# Altium footprint library SamacSys.PcbLib: 1008 footprints (part 25 of 63)
Each footprint in its own frame and in the unit in brackets; x right, y up, seen from the top. Pads: shape width x height; smd on the part's side, far side on the other; paste and mask are expansions set on the pad; w line width, h text height; cw(c..) or ccw(c..) is an arc to the next point about the centre after c.
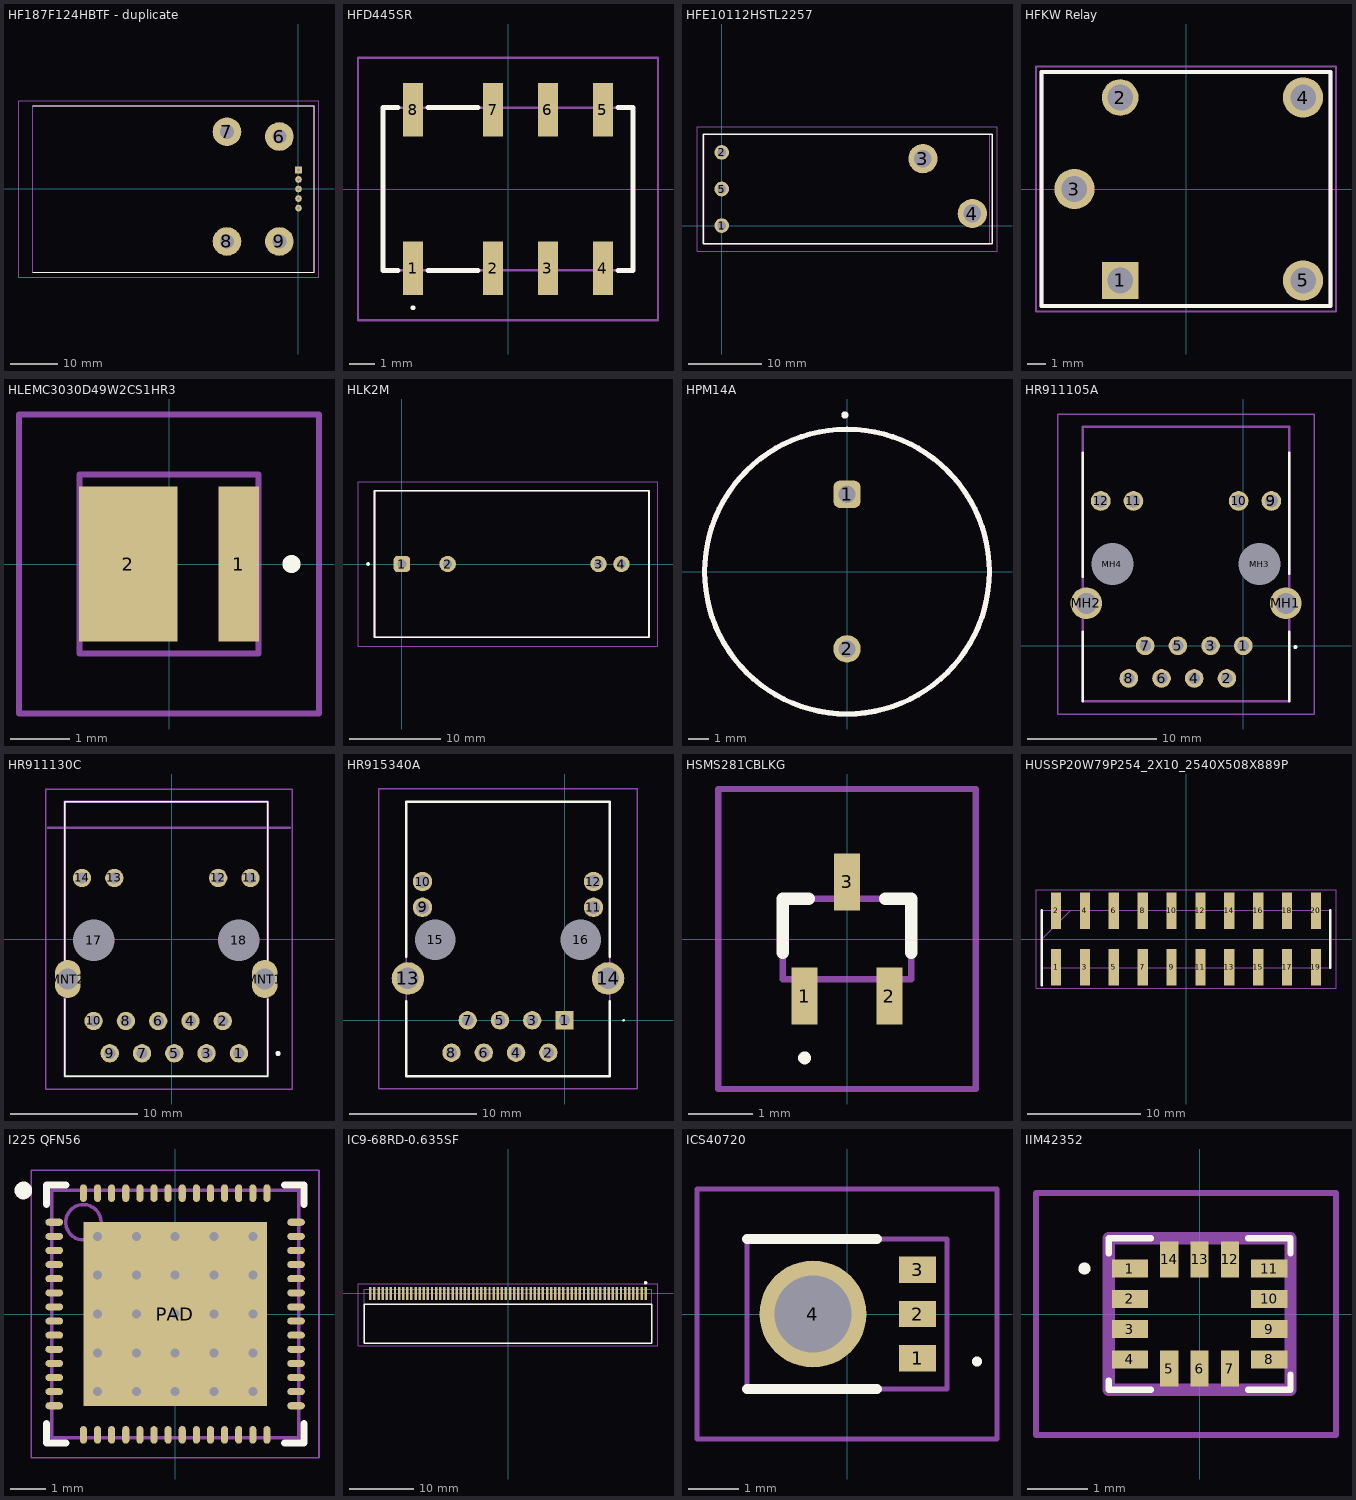
[diagram p24: the footprints below, top view; thin cyan lines are the x and y axes]

## HF187F124HBTF - duplicate [mm]
pads (9):
  rect 1.4x1.4 hole 0.7: 1(0,4)
  round 1.4 hole 0.7: 2(0,2) 3(0,0) 4(0,-4) 4(0,-2)
  round 6 hole 3: 6(-4,11) 7(-15,12) 8(-15,-11) 9(-4,-11)
Top Overlay:
  lines w0.2: -55.7,-17.5 3.3,-17.5 3.3,17.5 -55.7,17.5
Assembly:
  lines w0.1: -55.7,-17.5 3.3,-17.5 3.3,17.5 -55.7,17.5 -55.7,-17.5
Countryard:
  lines w0.1: -58.6,-18.5 4.3,-18.5 4.3,18.5 -58.6,18.5 -58.6,-18.5
3D body "HYCA-F08.STEP": height 5.27, standoff -27.11, extent -20,-13.05 2,13.05

## HFD445SR [mm]
pads (8):
  rect 0.8x2.15 smd: 1(-3.8,-3.175) 2(-0.6,-3.175) 3(1.6,-3.175) 4(3.8,-3.175) 5(3.8,3.175) 6(1.6,3.175) 7(-0.6,3.175) 8(-3.8,3.175)
Top Overlay:
  lines w0.1: -3.8,-4.8 cw(c-3.8,-4.75) -3.8,-4.7 cw(c-3.8,-4.75) -3.8,-4.8
  lines w0.2: -4.4,-3.25 -5,-3.25 -5,3.25 -4.4,3.25 ; -3.2,-3.25 -1.2,-3.25 ; -3.2,3.25 -1.2,3.25 ; 4.4,-3.25 5,-3.25 5,3.25 4.4,3.25
Assembly:
  lines w0.1: -5,-3.25 -5,3.25 5,3.25 5,-3.25 -5,-3.25
Countryard:
  lines w0.1: -6,-5.25 -6,5.25 6,5.25 6,-5.25 -6,-5.25
3D body "HFD4_4.5-SR.stp": height 5.76, standoff 0.11, extent -4.98,-3.86 5.02,3.64

## HFE10112HSTL2257 [mm]
pads (5):
  round 2 hole 1.2: 1(0,0) 2(0,10) 5(0,5)
  round 4 hole 2.4: 3(27.5,9.15) 4(34.25,1.65)
Top Overlay:
  lines w0.2: -2.5,-2.5 -2.5,12.5 37,12.5 37,-2.5 -2.5,-2.5
Assembly:
  lines w0.1: -2.375,-2.5 36.625,-2.5 36.625,12.5 -2.375,12.5 -2.375,-2.5
Countryard:
  lines w0.1: -3.375,-3.5 37.625,-3.5 37.625,13.5 -3.375,13.5 -3.375,-3.5
3D body "HFE10-1_12-HST-L2_257_.stp": height 32, standoff -5, extent -2.375,-2.5 36.625,12.5

## HFKW Relay [mm]
pads (5):
  rect 2x2 hole 1.4: 1(-3.6,-5)
  round 2 hole 1.4: 2(-3.6,5)
  round 2.2 hole 1.4: 3(-6.1,0) 4(6.4,5) 5(6.4,-5)
Top Overlay:
  lines w0.2: -7.9,-6.4 7.9,-6.4 7.9,6.4 -7.9,6.4 -7.9,-6.4
Assembly:
  lines w0.2: -7.9,-6.4 7.9,-6.4 7.9,6.4 -7.9,6.4 -7.9,-6.4
Countryard:
  lines w0.1: -8.2,-6.7 8.2,-6.7 8.2,6.7 -8.2,6.7 -8.2,-6.7
3D body: height 14, standoff 0, extent -7.8,-6.3 7.8,6.3

## HLEMC3030D49W2CS1HR3 [mm]
pads (2):
  rect 0.68x2.6 smd: 1(1.17,0)
  rect 1.65x2.6 smd: 2(-0.685,0)
Top Overlay:
  lines w0.2: 2,0 cw(c2.05,0) 2.1,0 ; 2,0 ccw(c2.05,0) 2.1,0 ; 2,0 cw(c2.05,0) 2.1,0
Assembly:
  lines w0.1: -1.5,-1.5 1.5,-1.5 1.5,1.5 -1.5,1.5 -1.5,-1.5
Countryard:
  lines w0.1: -2.51,-2.5 2.51,-2.5 2.51,2.5 -2.51,2.5 -2.51,-2.5
3D body "HL-EMC-3030D49W-2C-S1-HR3.stp": height 0.77, standoff 0, extent -1.5,-1.5 1.5,1.5

## HLK2M [mm]
height 19
pads (4):
  rrect50% 1.8x1.8 hole 1: 1(0,0)
  round 1.8 hole 1: 2(5,0) 3(21.5,0) 4(24,0)
Top Overlay:
  lines w0.2: -3.7,-0.1 cw(c-3.7,0) -3.7,0.1 cw(c-3.7,0) -3.7,-0.1 ; -3,-8 27,-8 27,8 -3,8 -3,-8
Assembly:
  lines w0.2: -3,-8 27,-8 27,8 -3,8 -3,-8
Countryard:
  lines w0.1: -4.8,-9 28,-9 28,9 -4.8,9 -4.8,-9
3D body "HLK-2M05.stp": height 19.1, standoff -5, extent -3,-8 27,8

## HPM14A [mm]
height 7
pads (2):
  rrect50% 1.35x1.35 hole 0.85: 1(0,3.8)
  round 1.35 hole 0.85: 2(0,-3.8)
Top Overlay:
  circle w0.254: c-0.1,7.7 r0.05
  circle w0.254: c0,0 r7
Assembly:
  circle w0.254: c0,0 r7
3D body: height 6.8, standoff 0, extent -6.939,-6.867 6.861,6.933

## HR911105A [mm]
pads (16):
  round 1.446 hole 0.89: 1(0,0) 2(-1.27,-2.54) 3(-2.54,0) 4(-3.81,-2.54) 5(-5.08,0) 6(-6.35,-2.54) 7(-7.62,0) 8(-8.89,-2.54)
  round 1.53 hole 1.02: 9(2.18,11.25) 10(-0.36,11.25) 11(-8.53,11.25) 12(-11.07,11.25)
  round 2.445 hole 1.63: MH1(3.3,3.3) MH2(-12.19,3.3)
  round 1.625 hole 3.25 unplated: MH3(1.27,6.35) MH4(-10.16,6.35)
Top Overlay:
  lines w0.2: -12.465,-4.3 -12.465,1.1 ; -12.465,5.35 -12.465,15 ; 3.575,-4.3 3.575,1.1 ; 3.575,5.6 3.575,15 ; 4.05,-0.15 ccw(c4.05,-0.1) 4.05,-0.05 ; 4.05,-0.15 cw(c4.05,-0.1) 4.05,-0.05 ; 4.05,-0.15 ccw(c4.05,-0.1) 4.05,-0.05
Assembly:
  lines w0.2: -12.465,-4.3 3.575,-4.3 3.575,17 -12.465,17 -12.465,-4.3
Countryard:
  lines w0.1: -14.417,-5.3 -14.417,18 5.518,18 5.518,-5.3 -14.417,-5.3
3D body "HR911105A.stp": height 13.53, standoff -2.97, extent -12.39,-4.08 3.49,17.32

## HR911130C [mm]
pads (18):
  round 1.446 hole 0.89: 1(5.265,-8.99) 2(3.995,-6.45) 3(2.725,-8.99) 4(1.455,-6.45) 5(0.185,-8.99) 6(-1.085,-6.45) 7(-2.355,-8.99) 8(-3.625,-6.45) 9(-4.895,-8.99) 10(-6.165,-6.45) 11(6.175,4.8) 12(3.635,4.8) 13(-4.535,4.8) 14(-7.075,4.8)
  round 1.625 hole 3.25 unplated: 17(-6.165,-0.1) 18(5.265,-0.1)
  oval 2x3 hole 1.63: MNT1(7.295,-3.15) MNT2(-8.195,-3.15)
Top Overlay:
  lines w0.1: -8.45,-4.7 -8.45,-10.8 7.55,-10.8 7.55,-4.7 ; -8.45,-1.7 -8.45,10.8 7.55,10.8 7.55,-1.7
  lines w0.2: 8.35,-9.1 cw(c8.35,-9) 8.35,-8.9 cw(c8.35,-9) 8.35,-9.1
Assembly:
  lines w0.2: -8.45,-10.8 7.55,-10.8 7.55,10.8 -8.45,10.8 -8.45,-10.8
Countryard:
  lines w0.1: -9.918,-11.8 9.45,-11.8 9.45,11.8 -9.918,11.8 -9.918,-11.8
Board Shape (Mech20):
  lines w0.2: -9.75,8.75 9.25,8.75
  text "PCB Edge" at -2.907,7.024 h2
3D body "HR911130C.stp": height 15.12, standoff -3.14, extent -9.39,-10.9 8.59,10.7

## HR915340A [mm]
pads (16):
  rect 1.446x1.446 hole 0.89: 1(0,0)
  round 1.446 hole 0.89: 2(-1.27,-2.54) 3(-2.54,0) 4(-3.81,-2.54) 5(-5.08,0) 6(-6.35,-2.54) 7(-7.62,0) 8(-8.89,-2.54)
  round 1.53 hole 1.02: 9(-11.17,8.89) 10(-11.17,10.92) 11(2.28,8.89) 12(2.28,10.92)
  round 2.55 hole 1.7: 13(-12.32,3.3) 14(3.43,3.3)
  round 1.6 hole 3.2 unplated: 15(-10.16,6.35) 16(1.27,6.35)
Top Overlay:
  lines w0.1: 4.6,0 cw(c4.65,0) 4.7,0 cw(c4.65,0) 4.6,0
  lines w0.2: -12.445,1.5 -12.445,-4.4 3.555,-4.4 3.555,1.5 ; -12.445,5 -12.445,17.2 3.555,17.2 3.555,5
Assembly:
  lines w0.1: -12.445,-4.4 3.555,-4.4 3.555,17.2 -12.445,17.2 -12.445,-4.4
Countryard:
  lines w0.1: -14.595,-5.4 5.705,-5.4 5.705,18.2 -14.595,18.2 -14.595,-5.4
3D body "HR915340A.stp": height 13.9, standoff -5, extent -13.07,-4.4 4.18,17.2

## HSMS281CBLKG [mil]
pads (3):
  rect 15.98x35 smd: 1(-25.98,-35) 2(25.98,-35) 3(0,35)
Top Overlay:
  lines w3.94: -25.98,-74.8 ccw(c-25.98,-72.83) -25.98,-70.87 ccw(c-25.98,-72.83) -25.98,-74.8
  lines w7.87: -39.37,-8.19 -39.37,24.61 -23.62,24.61 ; 23.62,24.61 39.37,24.61 39.37,-8.19
Assembly:
  lines w3.94: -39.37,-24.61 -39.37,24.61 39.37,24.61 39.37,-24.61 -39.37,-24.61
Countryard:
  lines w3.94: -78.74,-91.85 -78.74,91.85 78.74,91.85 78.74,-91.85 -78.74,-91.85
3D body "HSMS-281C-BLKG.stp": height 44.49, standoff 0.2, extent -44.29,-47.24 44.29,47.24

## HUSSP20W79P254_2X10_2540X508X889P [mm]
pads (20):
  rect 0.9x3.2 smd: 1(-11.43,-2.475) 2(-11.43,2.475) 3(-8.89,-2.475) 4(-8.89,2.475) 5(-6.35,-2.475) 6(-6.35,2.475) 7(-3.81,-2.475) 8(-3.81,2.475) 9(-1.27,-2.475) 10(-1.27,2.475) 11(1.27,-2.475) 12(1.27,2.475) 13(3.81,-2.475) 14(3.81,2.475) 15(6.35,-2.475) 16(6.35,2.475) 17(8.89,-2.475) 18(8.89,2.475) 19(11.43,-2.475) 20(11.43,2.475)
Top Overlay:
  lines w0.2: -12.7,-4.075 -12.7,2.54 ; 12.7,-2.54 12.7,2.54
Assembly:
  lines w0.1: -12.7,0 -10.16,2.54 ; -12.7,-2.54 12.7,-2.54 12.7,2.54 -12.7,2.54 -12.7,-2.54
Countryard:
  lines w0.05: -13.2,-4.325 13.2,-4.325 13.2,4.325 -13.2,4.325 -13.2,-4.325
3D body "61002021121.stp": height 9.95, standoff 0, extent -12.95,-3.75 12.95,3.75

## I225 QFN56 [mm]
pads (57):
  oval 0.5x0.2 smd: 1(-3.425,2.6) 2(-3.425,2.2) 3(-3.425,1.8) 4(-3.425,1.4) 5(-3.425,1) 6(-3.425,0.6) 7(-3.425,0.2) 8(-3.425,-0.2) 9(-3.425,-0.6) 10(-3.425,-1) 11(-3.425,-1.4) 12(-3.425,-1.8) 13(-3.425,-2.2) 14(-3.425,-2.6) 29(3.425,-2.6) 30(3.425,-2.2) 31(3.425,-1.8) 32(3.425,-1.4) 33(3.425,-1) 34(3.425,-0.6) 35(3.425,-0.2) 36(3.425,0.2) 37(3.425,0.6) 38(3.425,1) 39(3.425,1.4) 40(3.425,1.8) 41(3.425,2.2) 42(3.425,2.6)
  oval 0.2x0.5 smd: 15(-2.6,-3.425) 16(-2.2,-3.425) 17(-1.8,-3.425) 18(-1.4,-3.425) 19(-1,-3.425) 20(-0.6,-3.425) 21(-0.2,-3.425) 22(0.2,-3.425) 23(0.6,-3.425) 24(1,-3.425) 25(1.4,-3.425) 26(1.8,-3.425) 27(2.2,-3.425) 28(2.6,-3.425) 43(2.6,3.425) 44(2.2,3.425) 45(1.8,3.425) 46(1.4,3.425) 47(1,3.425) 48(0.6,3.425) 49(0.2,3.425) 50(-0.2,3.425) 51(-0.6,3.425) 52(-1,3.425) 53(-1.4,3.425) 54(-1.8,3.425) 55(-2.2,3.425) 56(-2.6,3.425)
  rect 5.2x5.2 smd: PAD(0,0)
via 2.2,2.2 diameter 0.406 hole 0.254
via 1.1,2.2 diameter 0.406 hole 0.254
via 0,2.2 diameter 0.406 hole 0.254
via -1.1,2.2 diameter 0.406 hole 0.254
via -2.2,2.2 diameter 0.406 hole 0.254
via 2.2,1.1 diameter 0.406 hole 0.254
via 1.1,1.1 diameter 0.406 hole 0.254
via 0,1.1 diameter 0.406 hole 0.254
via -1.1,1.1 diameter 0.406 hole 0.254
via -2.2,1.1 diameter 0.406 hole 0.254
via 2.2,0 diameter 0.406 hole 0.254
via 1.1,0 diameter 0.406 hole 0.254
via 0,0 diameter 0.406 hole 0.254
via -1.1,0 diameter 0.406 hole 0.254
via -2.2,0 diameter 0.406 hole 0.254
via 2.2,-1.1 diameter 0.406 hole 0.254
via 1.1,-1.1 diameter 0.406 hole 0.254
via 0,-1.1 diameter 0.406 hole 0.254
via -1.1,-1.1 diameter 0.406 hole 0.254
via -2.2,-1.1 diameter 0.406 hole 0.254
via 2.2,-2.2 diameter 0.406 hole 0.254
via 1.1,-2.2 diameter 0.406 hole 0.254
via 0,-2.2 diameter 0.406 hole 0.254
via -1.1,-2.2 diameter 0.406 hole 0.254
via -2.2,-2.2 diameter 0.406 hole 0.254
Top Overlay:
  circle w0.25: c-4.3,3.5 r0.125
  lines w0.2: -3.65,-3.1 -3.65,-3.65 -3.1,-3.65 ; -3.65,3.1 -3.65,3.65 -3.1,3.65 ; 3.1,-3.65 3.65,-3.65 3.65,-3.1 ; 3.1,3.65 3.65,3.65 3.65,3.1
Assembly:
  circle w0.1: c-2.6,2.6 r0.5
  lines w0.1: -3.5,-3.5 3.5,-3.5 3.5,3.5 -3.5,3.5 -3.5,-3.5
Countryard:
  lines w0.05: -4.075,-4.075 4.075,-4.075 4.075,4.075 -4.075,4.075 -4.075,-4.075
  lines w0.1: -0.5,0 0.5,0 ; 0,-0.5 0,0.5
3D body: height 0.9, standoff 0.05, extent -3.5,-3.5 3.5,3.5

## IC9-68RD-0.635SF [mm]
pads (68):
  rect 0.38x2 smd: 1(21.273,0) 2(20.002,0) 3(18.732,0) 4(17.462,0) 5(16.192,0) 6(14.922,0) 7(13.652,0) 8(12.383,0) 9(11.112,0) 10(9.842,0) 11(8.572,0) 12(7.302,0) 13(6.032,0) 14(4.763,0) 15(3.492,0) 16(2.222,0) 17(0.953,0) 18(-0.318,0) 19(-1.587,0) 20(-2.857,0) 21(-4.127,0) 22(-5.397,0) 23(-6.667,0) 24(-7.938,0) 25(-9.207,0) 26(-10.477,0) 27(-11.747,0) 28(-13.018,0) 29(-14.287,0) 30(-15.557,0) 31(-16.828,0) 32(-18.098,0) 33(-19.367,0) 34(-20.637,0) 35(20.637,0) 36(19.367,0) 37(18.098,0) 38(16.828,0) 39(15.557,0) 40(14.287,0) 41(13.018,0) 42(11.747,0) 43(10.477,0) 44(9.207,0) 45(7.938,0) 46(6.667,0) 47(5.397,0) 48(4.127,0) 49(2.857,0) 50(1.587,0) 51(0.318,0) 52(-0.953,0) 53(-2.222,0) 54(-3.492,0) 55(-4.763,0) 56(-6.032,0) 57(-7.302,0) 58(-8.572,0) 59(-9.842,0) 60(-11.112,0) 61(-12.383,0) 62(-13.652,0) 63(-14.922,0) 64(-16.192,0) 65(-17.462,0) 66(-18.732,0) 67(-20.002,0) 68(-21.273,0)
Top Overlay:
  lines w0.2: -22.18,-7.7 22.18,-7.7 22.18,-1.7 -22.18,-1.7 -22.18,-7.7
  lines w0.381: 21.273,1.574 cw(c21.273,1.637) 21.273,1.701 ; 21.273,1.574 ccw(c21.273,1.637) 21.273,1.701 ; 21.273,1.574 cw(c21.273,1.637) 21.273,1.701
Assembly:
  lines w0.1: -22.18,-7.7 22.18,-7.7 22.18,0.635 -22.18,0.635 -22.18,-7.7
Countryard:
  lines w0.1: -23.18,-8.1 23.18,-8.1 23.18,1.5 -23.18,1.5 -23.18,-8.1

## ICS40720 [mm]
pads (4):
  rect 0.73x0.53 smd: 1(1.41,-0.88) 2(1.41,0) 3(1.41,0.88)
  round 2.14 hole 1.54: 4(-0.68,0)
Top Overlay:
  lines w0.1: 2.6,-1 cw(c2.6,-0.95) 2.6,-0.9 cw(c2.6,-0.95) 2.6,-1
  lines w0.2: -2,-1.5 0.6,-1.5 ; -2,1.5 0.6,1.5
Assembly:
  lines w0.1: -2,-1.5 2,-1.5 2,1.5 -2,1.5 -2,-1.5
Countryard:
  lines w0.1: -3,-2.5 3,-2.5 3,2.5 -3,2.5 -3,-2.5
3D body "ICS-40720.stp": height 1.2, standoff 0, extent -2,-1.5 2,1.5

## IIM42352 [mm]
pads (14):
  rect 0.6x0.3 smd: 1(-1.15,0.75) 2(-1.15,0.25) 3(-1.15,-0.25) 4(-1.15,-0.75) 8(1.15,-0.75) 9(1.15,-0.25) 10(1.15,0.25) 11(1.15,0.75)
  rect 0.3x0.6 smd: 5(-0.5,-0.9) 6(0,-0.9) 7(0.5,-0.9) 12(0.5,0.9) 13(0,0.9) 14(-0.5,0.9)
Top Overlay:
  lines w0.1: -1.5,-1.1 -1.5,-1.25 -0.8,-1.25 ; -1.5,1 -1.5,1.25 -0.8,1.25 ; 0.8,-1.25 1.5,-1.25 1.5,-1 ; 0.8,1.25 1.5,1.25 1.5,1 ; -1.9,0.7 ccw(c-1.9,0.75) -1.9,0.8 ccw(c-1.9,0.75) -1.9,0.7
Assembly:
  lines w0.2: -1.5,-1.25 -1.5,1.25 1.5,1.25 1.5,-1.25 -1.5,-1.25
Countryard:
  lines w0.1: -2.7,-2 -2.7,2 2.25,2 2.25,-2 -2.7,-2
3D body "ICM-42605.stp": height 0.9, standoff -0.01, extent -1.5,-1.25 1.5,1.25